# Altium footprint library WE-RJ45 LAN.PcbLib: 101 footprints (part 4 of 7)
Each footprint in its own frame and in the unit in brackets; x right, y up, seen from the top. Pads: shape width x height; smd on the part's side, far side on the other; paste and mask are expansions set on the pad; w line width, h text height; cw(c..) or ccw(c..) is an arc to the next point about the centre after c.
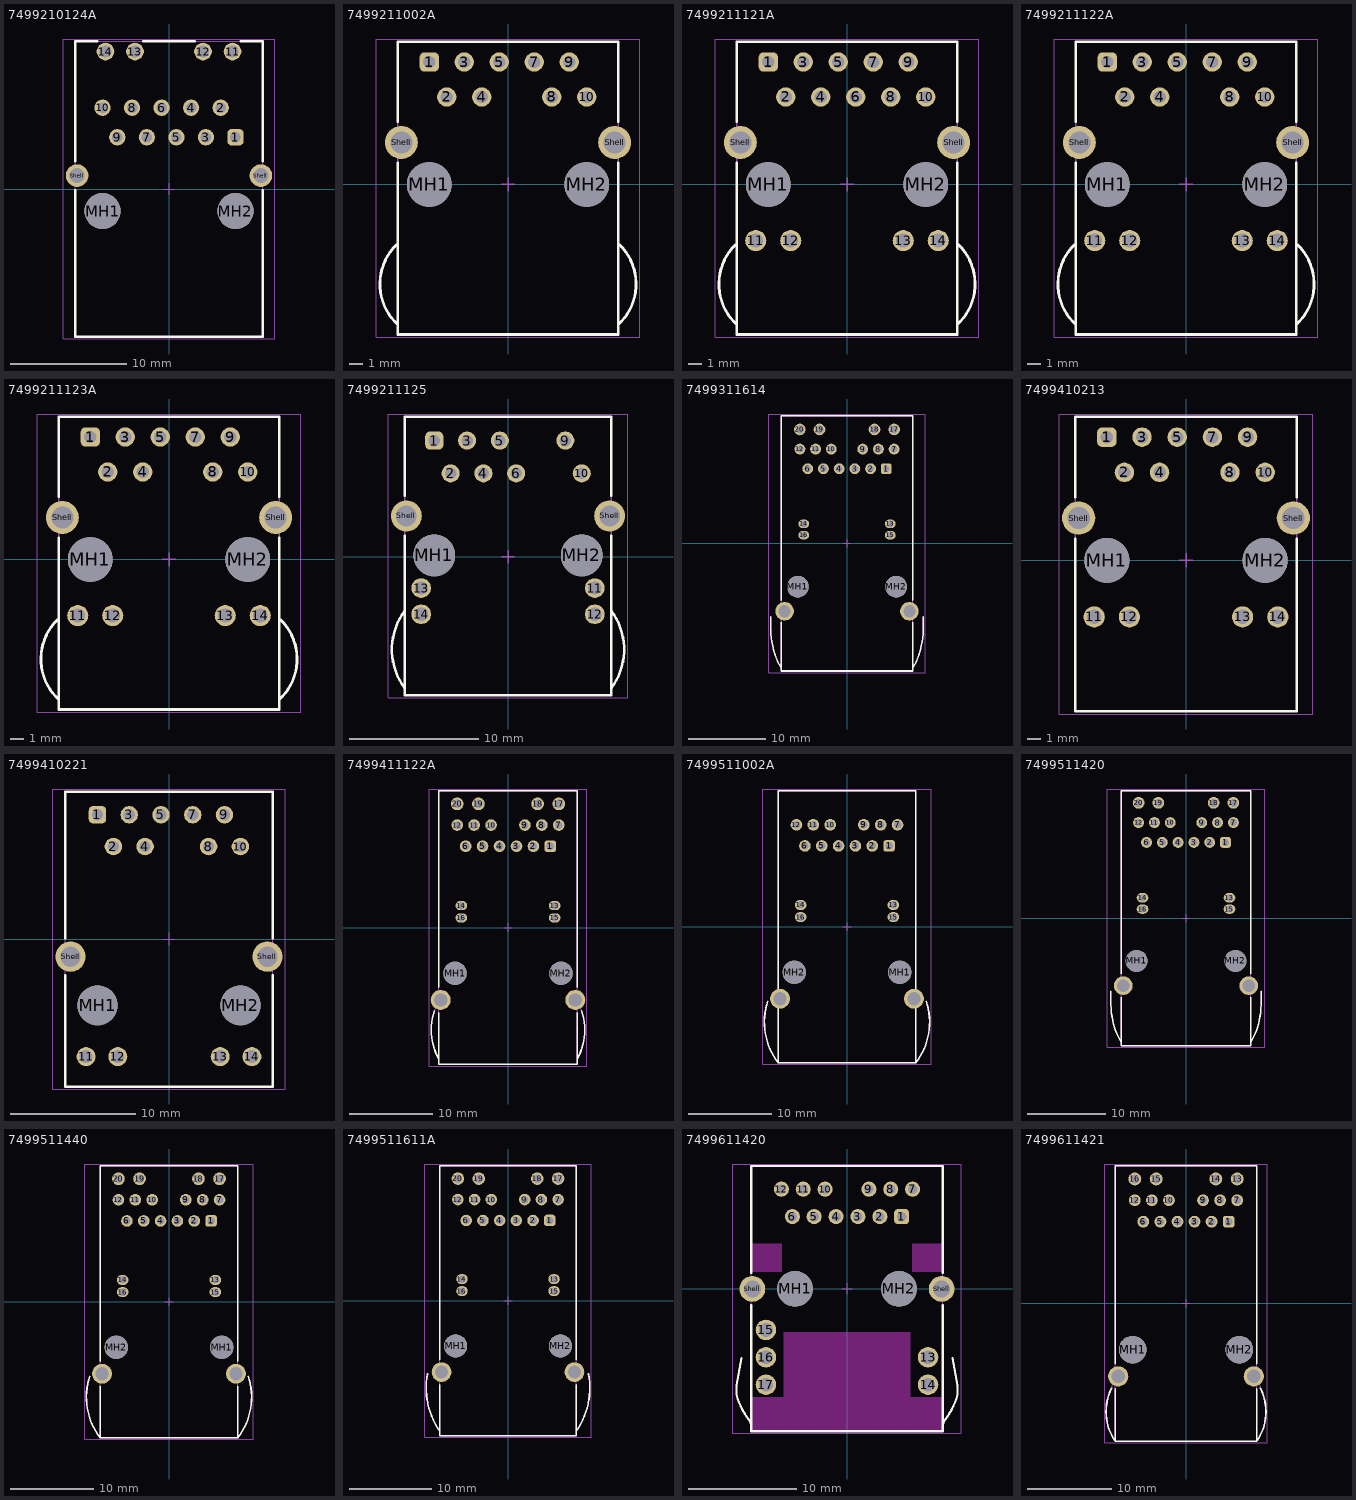
[diagram p3: the footprints below, top view; thin cyan lines are the x and y axes]

## 7499210124A [mm] "LAN Transformer, body 25.3x16.2mm"
height 13.5
pads (18):
  rrect50% 1.4x1.4 hole 0.9: 1(5.715,4.45)
  round 1.4 hole 0.9: 2(4.445,6.99) 3(3.175,4.45) 4(1.905,6.99) 5(0.635,4.45) 6(-0.635,6.99) 7(-1.905,4.45) 8(-3.175,6.99) 9(-4.445,4.45) 10(-5.715,6.99)
  round 1.52 hole 1.02: 11(5.465,11.82) 12(2.925,11.82) 13(-2.925,11.82) 14(-5.465,11.82)
  round 3.1 hole 3.1 unplated: MH1(-5.715,-1.9) MH2(5.715,-1.9)
  round 1.95 hole 1.3: Shell(-7.9,1.15) Shell(7.9,1.15)
Top Overlay:
  lines w0.2: -8.05,-0.1 -8.05,-12.7 8.05,-12.7 8.05,-0.1 ; -8.05,2.4 -8.05,12.7 -6.15,12.7 ; -2.24,12.7 2.24,12.7 ; 6.15,12.7 8.05,12.7 8.05,2.4
Top Assembly:
  lines w0.1: -8.05,-12.7 8.05,-12.7 8.05,12.7 -8.05,12.7 -8.05,-12.7
Top Designator:
  text ".Designator" at -3.647,-0.357 h1
Top 3D Body:
  lines w0.1: -8.05,-12.7 8.05,-12.7 8.05,12.7 -8.05,12.7 -8.05,-12.7
Top Courtyard:
  lines w0.05: -9.075,-12.9 -9.075,12.9 9.075,12.9 9.075,-12.9 -9.075,-12.9
Top Component Center:
  lines w0.1: -0.5,0 0.5,0 ; 0,-0.5 0,0.5
3D body "7499210124A.stp": height 13.55, standoff -3.25, extent -8.2,-12.7 8.2,12.7

## 7499211002A [mm] "Integrated RJ45 Transformer, THT, body 16.00 x 21.25 mm"
height 13.5
pads (13):
  rrect50% 1.4x1.4 hole 0.9: 1(-5.715,8.89)
  round 1.4 hole 0.9: 2(-4.445,6.35) 3(-3.175,8.89) 4(-1.905,6.35) 5(-0.635,8.89) 7(1.905,8.89) 8(3.175,6.35) 9(4.445,8.89) 10(5.715,6.35)
  round 3.25 hole 3.25 unplated: MH1(-5.715,0) MH2(5.715,0)
  round 2.4 hole 1.6: Shell(-7.745,3.05) Shell(7.745,3.05)
Top Overlay:
  lines w0.2: -8.099,-4.377 ccw(c-5.31,-7.23) -8.001,-10.176 ; -8,1.55 -8,-10.89 8,-10.89 8,1.55 ; -8,4.55 -8,10.36 8,10.36 8,4.55 ; 8.001,-10.176 ccw(c5.31,-7.23) 8.099,-4.377
Top Assembly:
  lines w0.1: -8.099,-4.377 ccw(c-5.31,-7.23) -8.001,-10.176 ; 8.001,-10.176 ccw(c5.31,-7.23) 8.099,-4.377 ; -8,-10.89 8,-10.89 8,10.36 -8,10.36 -8,-10.89
Top Designator:
  text ".Designator" at -3.647,-0.357 h1
Top 3D Body:
  lines w0.1: -8.099,-4.377 ccw(c-5.31,-7.23) -8.001,-10.176 ; 8.001,-10.176 ccw(c5.31,-7.23) 8.099,-4.377 ; -8,-10.89 8,-10.89 8,10.36 -8,10.36 -8,-10.89
Top Courtyard:
  lines w0.05: -9.548,-11.09 9.548,-11.09 9.548,10.56 -9.548,10.56 -9.548,-11.09
Top Component Center:
  lines w0.1: -0.5,0 0.5,0 ; 0,-0.5 0,0.5
3D body "7499211002A.stp": height 14.85, standoff -3.6, extent -9.348,-10.89 9.348,10.36

## 7499211121A [mm] "LAN Transformer, body 21.84x15.88mm"
height 13.95
pads (18):
  rrect50% 1.4x1.4 hole 0.9: 1(-5.715,8.89)
  round 1.4 hole 0.9: 2(-4.445,6.35) 3(-3.175,8.89) 4(-1.905,6.35) 5(-0.635,8.89) 6(0.635,6.35) 7(1.905,8.89) 8(3.175,6.35) 9(4.445,8.89) 10(5.715,6.35)
  round 1.53 hole 1.03: 11(-6.625,-4.08) 12(-4.085,-4.08) 13(4.085,-4.08) 14(6.625,-4.08)
  round 3.25 hole 3.25 unplated: MH1(-5.715,0) MH2(5.715,0)
  round 2.4 hole 1.6: Shell(-7.745,3.05) Shell(7.745,3.05)
Top Overlay:
  lines w0.2: -8.099,-4.377 ccw(c-5.31,-7.23) -8.001,-10.176 ; -8,1.55 -8,-10.89 8,-10.89 8,1.55 ; -8,4.55 -8,10.36 8,10.36 8,4.55 ; 8.001,-10.176 ccw(c5.31,-7.23) 8.099,-4.377
Top Assembly:
  lines w0.1: -8.099,-4.377 ccw(c-5.31,-7.23) -8.001,-10.176 ; 8.001,-10.176 ccw(c5.31,-7.23) 8.099,-4.377 ; -8,-10.89 8,-10.89 8,10.36 -8,10.36 -8,-10.89
Top Designator:
  text ".Designator" at -3.647,-0.357 h1
Top 3D Body:
  lines w0.1: -8.099,-4.377 ccw(c-5.31,-7.23) -8.001,-10.176 ; 8.001,-10.176 ccw(c5.31,-7.23) 8.099,-4.377 ; -8,-10.89 8,-10.89 8,10.36 -8,10.36 -8,-10.89
Top Courtyard:
  lines w0.05: -9.548,-11.09 9.548,-11.09 9.548,10.56 -9.548,10.56 -9.548,-11.09
Top Component Center:
  lines w0.1: -0.5,0 0.5,0 ; 0,-0.5 0,0.5
3D body "7499211121A.stp": height 14.9, standoff -3.55, extent -9.348,-10.89 9.348,10.36

## 7499211122A [mm] "RJ45 LAN Transformer, body 16.00 x 21.25 mm"
height 13.5
pads (17):
  rrect50% 1.4x1.4 hole 0.9: 1(-5.715,8.89)
  round 1.4 hole 0.9: 2(-4.445,6.35) 3(-3.175,8.89) 4(-1.905,6.35) 5(-0.635,8.89) 7(1.905,8.89) 8(3.175,6.35) 9(4.445,8.89) 10(5.715,6.35)
  round 1.53 hole 1.03: 11(-6.625,-4.08) 12(-4.085,-4.08) 13(4.085,-4.08) 14(6.625,-4.08)
  round 3.25 hole 3.25 unplated: MH1(-5.715,0) MH2(5.715,0)
  round 2.4 hole 1.6: Shell(-7.745,3.05) Shell(7.745,3.05)
Top Overlay:
  lines w0.2: -8.099,-4.377 ccw(c-5.31,-7.23) -8.001,-10.176 ; -8,1.55 -8,-10.89 8,-10.89 8,1.55 ; -8,4.55 -8,10.36 8,10.36 8,4.55 ; 8.001,-10.176 ccw(c5.31,-7.23) 8.099,-4.377
Top Assembly:
  lines w0.1: -8.099,-4.377 ccw(c-5.31,-7.23) -8.001,-10.176 ; 8.001,-10.176 ccw(c5.31,-7.23) 8.099,-4.377 ; -8,-10.89 -8,10.36 8,10.36 8,-10.89 -8,-10.89
Top Designator:
  text ".Designator" at -3.647,-0.357 h1
Top 3D Body:
  lines w0.1: -8.099,-4.377 ccw(c-5.31,-7.23) -8.001,-10.176 ; 8.001,-10.176 ccw(c5.31,-7.23) 8.099,-4.377 ; -8,-10.89 -8,10.36 8,10.36 8,-10.89 -8,-10.89
Top Courtyard:
  lines w0.05: -9.548,-11.09 -9.548,10.56 9.548,10.56 9.548,-11.09 -9.548,-11.09
Top Component Center:
  lines w0.1: -0.5,0 0.5,0 ; 0,-0.5 0,0.5
3D body "7499211122A.stp": height 14.9, standoff -3.55, extent -9.348,-10.89 9.348,10.36

## 7499211123A [mm] "Integrated RJ45 Transformer, THT, body 16.00 x 21.25 mm"
height 13.5
pads (17):
  rrect50% 1.4x1.4 hole 0.9: 1(-5.715,8.89)
  round 1.4 hole 0.9: 2(-4.445,6.35) 3(-3.175,8.89) 4(-1.905,6.35) 5(-0.635,8.89) 7(1.905,8.89) 8(3.175,6.35) 9(4.445,8.89) 10(5.715,6.35)
  round 1.53 hole 1.03: 11(-6.625,-4.08) 12(-4.085,-4.08) 13(4.085,-4.08) 14(6.625,-4.08)
  round 3.25 hole 3.25 unplated: MH1(-5.715,0) MH2(5.715,0)
  round 2.4 hole 1.6: Shell(-7.745,3.05) Shell(7.745,3.05)
Top Overlay:
  lines w0.2: -8.099,-4.377 ccw(c-5.31,-7.23) -8.001,-10.176 ; -8,1.55 -8,-10.89 8,-10.89 8,1.55 ; -8,4.55 -8,10.36 8,10.36 8,4.55 ; 8.001,-10.176 ccw(c5.31,-7.23) 8.099,-4.377
Top Assembly:
  lines w0.1: -8.099,-4.377 ccw(c-5.31,-7.23) -8.001,-10.176 ; 8.001,-10.176 ccw(c5.31,-7.23) 8.099,-4.377 ; -8,-10.89 -8,10.36 8,10.36 8,-10.89 -8,-10.89
Top Designator:
  text ".Designator" at -3.647,-0.357 h1
Top 3D Body:
  lines w0.1: -8.099,-4.377 ccw(c-5.31,-7.23) -8.001,-10.176 ; 8.001,-10.176 ccw(c5.31,-7.23) 8.099,-4.377 ; -8,-10.89 -8,10.36 8,10.36 8,-10.89 -8,-10.89
Top Courtyard:
  lines w0.05: -9.548,-11.09 -9.548,10.56 9.548,10.56 9.548,-11.09 -9.548,-11.09
Top Component Center:
  lines w0.1: -0.5,0 0.5,0 ; 0,-0.5 0,0.5
3D body "7499211123A.stp": height 14.85, standoff -3.6, extent -9.348,-10.89 9.348,10.36

## 7499211125 [mm] "LAN Transformer, body 21.3x16mm"
height 13.55
pads (16):
  rrect50% 1.4x1.4 hole 0.89: 1(-5.715,8.99)
  round 1.4 hole 0.89: 2(-4.445,6.45) 3(-3.175,8.99) 4(-1.905,6.45) 5(-0.635,8.99) 6(0.635,6.45) 9(4.445,8.99) 10(5.715,6.45)
  round 1.52 hole 1.02: 11(6.725,-2.44) 12(6.725,-4.47) 13(-6.725,-2.44) 14(-6.725,-4.47)
  round 3.25 hole 3.25 unplated: MH1(-5.715,0.1) MH2(5.715,0.1)
  round 2.4 hole 1.6: Shell(-7.875,3.15) Shell(7.875,3.15)
Top Overlay:
  lines w0.2: -8,-10.2 cw(c-4,-7.2) -8,-4.2 ; -8,1.6 -8,-10.75 8,-10.75 8,1.6 ; -8,4.7 -8,10.85 8,10.85 8,4.7 ; 8,-10.2 ccw(c4,-7.2) 8,-4.2
Top Assembly:
  lines w0.1: -8,-10.2 cw(c-4,-7.2) -8,-4.2 ; 8,-10.2 ccw(c4,-7.2) 8,-4.2 ; -8,-10.75 -8,10.85 8,10.85 8,-10.75 ; -8,-10.75 8,-10.75 ; -8,-10.75 8,-10.75
Top Designator:
  text ".Designator" at -3.647,-0.357 h1
Top 3D Body:
  lines w0.1: -8,-10.2 cw(c-4,-7.2) -8,-4.2 ; 8,-10.2 ccw(c4,-7.2) 8,-4.2 ; -8,-10.75 -8,10.85 8,10.85 8,-10.75 ; -8,-10.75 8,-10.75 ; -8,-10.75 8,-10.75
Top Courtyard:
  lines w0.05: -9.275,-10.95 9.275,-10.95 9.275,11.05 -9.275,11.05 -9.275,-10.95
Top Component Center:
  lines w0.1: -0.5,0 0.5,0 ; 0,-0.5 0,0.5
3D body "7499211125.stp": height 14.65, standoff -2.98, extent -8.956,-10.75 8.956,10.85

## 7499311614 [mm] "10/100/1000 Base-T, PoE, THT, 1x1, Tab up, with shield tabs, with LED L-R green/orange-yellow, ETR"
height 13.87
pads (24):
  rrect50% 1.4x1.4 hole 0.89: 1(5.075,9.63)
  round 1.4 hole 0.89: 2(3.045,9.63) 3(1.015,9.63) 4(-1.015,9.63) 5(-3.045,9.63) 6(-5.075,9.63) 7(6.09,12.17) 8(4.06,12.17) 9(2.03,12.17) 10(-2.03,12.17) 11(-4.06,12.17) 12(-6.09,12.17)
  oval 1.4x1.1 hole 0.89: 13(5.59,2.51) 14(-5.59,2.51) 15(5.59,1.05) 16(-5.59,1.05)
  round 1.5 hole 1.02: 17(6.095,14.71) 18(3.555,14.71) 19(-3.555,14.71) 20(-6.095,14.71)
  round 2.8 hole 2.8 unplated: MH1(-6.35,-5.61) MH2(6.35,-5.61)
  round 2.4 hole 1.57: Shell(-8.065,-8.79) Shell(8.065,-8.79)
Top Overlay:
  lines w0.2: -9.857,-9.51 -9.857,-11.238 ccw(c1.3,-10.91) -9.621,-13.217 ccw(c-1.503,-11.736) -8.5,-16.11 ; -8.5,-10.21 -8.5,-16.51 8.5,-16.51 8.5,-10.21 ; -8.5,-7.37 -8.5,16.51 8.5,16.51 8.5,-7.37 ; 8.5,-16.11 ccw(c1.503,-11.736) 9.621,-13.217 ccw(c-1.3,-10.91) 9.857,-11.238 9.857,-9.51
Top Assembly:
  lines w0.1: -9.857,-9.51 -9.857,-11.238 ccw(c1.3,-10.91) -9.621,-13.217 ccw(c-1.503,-11.736) -8.5,-16.11 ; 8.5,-16.11 ccw(c1.503,-11.736) 9.621,-13.217 ccw(c-1.3,-10.91) 9.857,-11.238 9.857,-9.51 ; -8.5,-16.51 -8.5,16.51 8.5,16.51 8.5,-16.51 -8.5,-16.51
Top Designator:
  text ".Designator" at -3.647,-0.357 h1
Top 3D Body:
  lines w0.1: -9.857,-9.51 -9.857,-11.238 ccw(c1.3,-10.91) -9.621,-13.217 ccw(c-1.503,-11.736) -8.5,-16.11 ; 8.5,-16.11 ccw(c1.503,-11.736) 9.621,-13.217 ccw(c-1.3,-10.91) 9.857,-11.238 9.857,-9.51 ; -8.5,-16.51 -8.5,16.51 8.5,16.51 8.5,-16.51 -8.5,-16.51
Top Courtyard:
  lines w0.05: -10.09,-16.71 -10.09,16.71 10.09,16.71 10.09,-16.71 -10.09,-16.71
Top Component Center:
  lines w0.1: -0.5,0 0.5,0 ; 0,-0.5 0,0.5
3D body "7499311614.stp": height 15.53, standoff -3.32, extent -9.89,-16.51 9.89,16.51

## 7499410213 [mm] "Integrated RJ45 Transformer, THT, body 16.00 x 21.25 mm"
height 13.5
pads (17):
  rrect50% 1.4x1.4 hole 0.9: 1(-5.715,8.89)
  round 1.4 hole 0.9: 2(-4.445,6.35) 3(-3.175,8.89) 4(-1.905,6.35) 5(-0.635,8.89) 7(1.905,8.89) 8(3.175,6.35) 9(4.445,8.89) 10(5.715,6.35)
  round 1.53 hole 1.03: 11(-6.625,-4.08) 12(-4.085,-4.08) 13(4.085,-4.08) 14(6.625,-4.08)
  round 3.25 hole 3.25 unplated: MH1(-5.715,0) MH2(5.715,0)
  round 2.4 hole 1.6: Shell(-7.745,3.05) Shell(7.745,3.05)
Top Overlay:
  lines w0.2: -8,1.55 -8,-10.89 8,-10.89 8,1.55 ; -8,4.55 -8,10.36 8,10.36 8,4.55
Top Assembly:
  lines w0.1: -8,-10.89 8,-10.89 8,10.36 -8,10.36 -8,-10.89
Top Designator:
  text ".Designator" at -3.647,-0.357 h1
Top 3D Body:
  lines w0.1: -8,-10.89 8,-10.89 8,10.36 -8,10.36 -8,-10.89
Top Courtyard:
  lines w0.05: -9.145,-11.09 9.145,-11.09 9.145,10.56 -9.145,10.56 -9.145,-11.09
Top Component Center:
  lines w0.1: -0.5,0 0.5,0 ; 0,-0.5 0,0.5
3D body "7499410213.stp": height 13.5, standoff -3.6, extent -8.15,-10.89 8.15,10.36

## 7499410221 [mm] "LAN Transformer, body 23.6x16.6mm"
height 17.1
pads (17):
  rrect50% 1.4x1.4 hole 0.89: 1(-5.72,9.94)
  round 1.4 hole 0.89: 2(-4.45,7.4) 3(-3.18,9.94) 4(-1.91,7.4) 5(-0.64,9.94) 7(1.9,9.94) 8(3.17,7.4) 9(4.44,9.94) 10(5.71,7.4)
  round 1.52 hole 1.02: 11(-6.635,-9.41) 12(-4.095,-9.41) 13(4.095,-9.41) 14(6.635,-9.41)
  round 3.2 hole 3.2 unplated: MH1(-5.715,-5.3) MH2(5.715,-5.3)
  round 2.43 hole 1.63: Shell(-7.875,-1.41) Shell(7.875,-1.41)
Top Overlay:
  lines w0.2: -8.3,-2.9 -8.3,-11.8 8.3,-11.8 8.3,-2.9 ; -8.3,0.05 -8.3,11.8 8.3,11.8 8.3,0.05
Top Assembly:
  lines w0.1: -8.3,-11.8 8.3,-11.8 8.3,11.8 -8.3,11.8 -8.3,-11.8
Top Designator:
  text ".Designator" at -3.647,-0.357 h1
Top 3D Body:
  lines w0.1: -8.3,-11.8 8.3,-11.8 8.3,11.8 -8.3,11.8 -8.3,-11.8
Top Courtyard:
  lines w0.05: -9.29,-12 -9.29,12 9.29,12 9.29,-12 -9.29,-12
Top Component Center:
  lines w0.1: -0.5,0 0.5,0 ; 0,-0.5 0,0.5
3D body "7499410221.stp": height 17.55, standoff -2.9, extent -8.3,-11.8 8.3,11.8

## 7499411122A [mm] "LAN Transformer, body 33.02x17mm"
height 13.87
pads (24):
  rrect50% 1.4x1.4 hole 0.9: 1(5.075,9.74)
  round 1.4 hole 0.9: 2(3.045,9.74) 3(1.015,9.74) 4(-1.015,9.74) 5(-3.045,9.74) 6(-5.075,9.74) 7(6.09,12.28) 8(4.06,12.28) 9(2.03,12.28) 10(-2.03,12.28) 11(-4.06,12.28) 12(-6.09,12.28)
  oval 1.4x1.1 hole 0.9: 13(5.59,2.62) 14(-5.59,2.62) 15(5.59,1.16) 16(-5.59,1.16)
  round 1.53 hole 1.03: 17(6.09,14.82) 18(3.55,14.82) 19(-3.55,14.82) 20(-6.09,14.82)
  round 2.8 hole 2.8 unplated: MH1(-6.35,-5.5) MH2(6.35,-5.5)
  round 2.4 hole 1.6: Shell(-8.065,-8.68) Shell(8.065,-8.68)
Top Overlay:
  lines w0.2: -8.82,-10.01 ccw(c-2.15,-12.3) -8.3,-15.75 ; -8.3,-10.2 -8.3,-16.4 8.3,-16.4 8.3,-10.2 ; -8.3,-7.16 -8.3,16.4 8.3,16.4 8.3,-7.16 ; 8.3,-15.75 ccw(c2.15,-12.3) 8.82,-10.01
Top Assembly:
  lines w0.1: -8.3,-15.75 cw(c-2.15,-12.3) -8.3,-8.85 ; 8.3,-15.75 ccw(c2.15,-12.3) 8.3,-8.85 ; -8.3,-16.4 -8.3,16.4 8.3,16.4 8.3,-16.4 -8.3,-16.4
Top Designator:
  text ".Designator" at -3.647,-0.357 h1
Top 3D Body:
  lines w0.1: -8.3,-15.75 cw(c-2.15,-12.3) -8.3,-8.85 ; 8.3,-15.75 ccw(c2.15,-12.3) 8.3,-8.85 ; -8.3,-16.4 -8.3,16.4 8.3,16.4 8.3,-16.4 -8.3,-16.4
Top Courtyard:
  lines w0.05: -9.465,-16.6 -9.465,16.6 9.465,16.6 9.465,-16.6 -9.465,-16.6
Top Component Center:
  lines w0.1: -0.5,0 0.5,0 ; 0,-0.5 0,0.5
3D body "7499411122A.stp": height 14.67, standoff -3, extent -9.193,-16.4 9.193,16.4

## 7499511002A [mm] "LAN Transformer, body 33.02x17.02mm"
height 13.87
pads (20):
  rrect50% 1.4x1.4 hole 0.9: 1(5.075,9.74)
  round 1.4 hole 0.9: 2(3.045,9.74) 3(1.015,9.74) 4(-1.015,9.74) 5(-3.045,9.74) 6(-5.075,9.74) 7(6.09,12.28) 8(4.06,12.28) 9(2.03,12.28) 10(-2.03,12.28) 11(-4.06,12.28) 12(-6.09,12.28)
  oval 1.4x1.2 hole 0.9: 13(5.59,2.62) 14(-5.59,2.62) 15(5.59,1.16) 16(-5.59,1.16)
  round 2.8 hole 2.8 unplated: MH1(6.35,-5.5) MH2(-6.35,-5.5)
  round 2.4 hole 1.6: Shell(-8.065,-8.68) Shell(8.065,-8.68)
Top Overlay:
  lines w0.2: -9.557,-8.983 ccw(c-1.9,-11.5) -8.3,-16.4 ; 9.557,-8.983 cw(c1.9,-11.5) 8.3,-16.4 ; -8.3,-16.4 -8.3,16.4 8.3,16.4 8.3,-16.4 ; -8.3,-16.4 8.3,-16.4
Top Assembly:
  lines w0.1: -9.557,-8.983 ccw(c-1.9,-11.5) -8.3,-16.4 ; 9.557,-8.983 cw(c1.9,-11.5) 8.3,-16.4 ; -8.3,-16.4 -8.3,16.4 8.3,16.4 8.3,-16.4 ; -8.3,-16.4 8.3,-16.4
Top Designator:
  text ".Designator" at -3.647,-0.357 h1
Top 3D Body:
  lines w0.1: -9.557,-8.983 ccw(c-1.9,-11.5) -8.3,-16.4 ; 9.557,-8.983 cw(c1.9,-11.5) 8.3,-16.4 ; -8.3,-16.4 -8.3,16.4 8.3,16.4 8.3,-16.4 ; -8.3,-16.4 8.3,-16.4
Top Courtyard:
  lines w0.05: -10.149,-16.6 10.149,-16.6 10.149,16.6 -10.149,16.6 -10.149,-16.6
Top Component Center:
  lines w0.1: -0.5,0 0.5,0 ; 0,-0.5 0,0.5
3D body "7499511002A.stp": height 15.43, standoff -3.58, extent -9.949,-16.4 9.949,16.4

## 7499511420 [mm] "10/100/1000 Base-T, PoE+, THT, 1x1, Tab up, with shield tabs, with LED L-R green/yellow-green/yellow"
height 13.87
pads (24):
  rrect50% 1.4x1.4 hole 0.9: 1(5.075,9.74)
  round 1.4 hole 0.9: 2(3.045,9.74) 3(1.015,9.74) 4(-1.015,9.74) 5(-3.045,9.74) 6(-5.075,9.74) 7(6.09,12.28) 8(4.06,12.28) 9(2.03,12.28) 10(-2.03,12.28) 11(-4.06,12.28) 12(-6.09,12.28)
  oval 1.5x1.2 hole 0.9: 13(5.59,2.62) 14(-5.59,2.62) 15(5.59,1.16) 16(-5.59,1.16)
  round 1.5 hole 1.02: 17(6.09,14.82) 18(3.55,14.82) 19(-3.55,14.82) 20(-6.09,14.82)
  round 2.8 hole 2.8 unplated: MH1(-6.35,-5.5) MH2(6.35,-5.5)
  round 2.4 hole 1.6: Shell(-8.065,-8.68) Shell(8.065,-8.68)
Top Overlay:
  lines w0.2: -9.657,-9.4 -9.657,-11.128 ccw(c1.5,-10.8) -9.421,-13.107 ccw(c-1.303,-11.626) -8.3,-16 ; -8.3,-10.2 -8.3,-16.4 8.3,-16.4 8.3,-10.2 ; -8.3,-7.16 -8.3,16.4 8.3,16.4 8.3,-7.16 ; 8.3,-16 ccw(c1.303,-11.626) 9.421,-13.107 ccw(c-1.5,-10.8) 9.657,-11.128 9.657,-9.4
Top Assembly:
  lines w0.1: -9.657,-9.4 -9.657,-11.128 ccw(c1.5,-10.8) -9.421,-13.107 ccw(c-1.303,-11.626) -8.3,-16 ; 8.3,-16 ccw(c1.303,-11.626) 9.421,-13.107 ccw(c-1.5,-10.8) 9.657,-11.128 9.657,-9.4 ; -8.3,-16.4 8.3,-16.4 8.3,16.4 -8.3,16.4 -8.3,-16.4
Top Designator:
  text ".Designator" at -3.647,-0.357 h1
Top 3D Body:
  lines w0.1: -9.657,-9.4 -9.657,-11.128 ccw(c1.5,-10.8) -9.421,-13.107 ccw(c-1.303,-11.626) -8.3,-16 ; 8.3,-16 ccw(c1.303,-11.626) 9.421,-13.107 ccw(c-1.5,-10.8) 9.657,-11.128 9.657,-9.4 ; -8.3,-16.4 8.3,-16.4 8.3,16.4 -8.3,16.4 -8.3,-16.4
Top Courtyard:
  lines w0.05: -10.115,-16.6 -10.115,16.6 10.115,16.6 10.115,-16.6 -10.115,-16.6
Top Component Center:
  lines w0.1: -0.5,0 0.5,0 ; 0,-0.5 0,0.5
3D body "7499511420.stp": height 15.23, standoff -3.66, extent -9.915,-16.4 9.915,16.4

## 7499511440 [mm] "LAN Transformer, body 33.02x17mm"
height 13.87
pads (24):
  rrect50% 1.4x1.4 hole 0.9: 1(5.075,9.74)
  round 1.4 hole 0.9: 2(3.045,9.74) 3(1.015,9.74) 4(-1.015,9.74) 5(-3.045,9.74) 6(-5.075,9.74) 7(6.09,12.28) 8(4.06,12.28) 9(2.03,12.28) 10(-2.03,12.28) 11(-4.06,12.28) 12(-6.09,12.28)
  oval 1.4x1.2 hole 0.9: 13(5.59,2.62) 14(-5.59,2.62) 15(5.59,1.16) 16(-5.59,1.16)
  round 1.52 hole 1.03: 17(6.09,14.82) 18(3.55,14.82) 19(-3.55,14.82) 20(-6.09,14.82)
  round 2.8 hole 2.8 unplated: MH1(6.35,-5.5) MH2(-6.35,-5.5)
  round 2.4 hole 1.6: Shell(-8.065,-8.68) Shell(8.065,-8.68)
Top Overlay:
  lines w0.2: -9.557,-8.983 ccw(c-1.9,-11.5) -8.3,-16.4 ; -8.3,-10.2 -8.3,-16.4 ; -8.3,-7.16 -8.3,16.4 8.3,16.4 8.3,-7.16 ; 8.3,-10.2 8.3,-16.4 ; 9.557,-8.983 cw(c1.9,-11.5) 8.3,-16.4 ; -8.3,-16.4 8.3,-16.4
Top Assembly:
  lines w0.1: -9.557,-8.983 ccw(c-1.9,-11.5) -8.3,-16.4 ; 9.557,-8.983 cw(c1.9,-11.5) 8.3,-16.4 ; -8.3,-16.4 -8.3,16.4 8.3,16.4 8.3,-16.4 ; -8.3,-16.4 8.3,-16.4
Top Designator:
  text ".Designator" at -3.647,-0.357 h1
Top 3D Body:
  lines w0.1: -9.557,-8.983 ccw(c-1.9,-11.5) -8.3,-16.4 ; 9.557,-8.983 cw(c1.9,-11.5) 8.3,-16.4 ; -8.3,-16.4 -8.3,16.4 8.3,16.4 8.3,-16.4 ; -8.3,-16.4 8.3,-16.4
Top Courtyard:
  lines w0.05: -10.15,-16.6 10.15,-16.6 10.15,16.6 -10.15,16.6 -10.15,-16.6
Top Component Center:
  lines w0.1: -0.5,0 0.5,0 ; 0,-0.5 0,0.5
3D body "7499511440.stp": height 15.3, standoff -3.64, extent -9.95,-16.4 9.95,16.4

## 7499511611A [mm] "LAN Transformer, body 33.02x17mm"
height 13.87
pads (24):
  rrect50% 1.4x1.4 hole 0.9: 1(5.075,9.74)
  round 1.4 hole 0.9: 2(3.045,9.74) 3(1.015,9.74) 4(-1.015,9.74) 5(-3.045,9.74) 6(-5.075,9.74) 7(6.09,12.28) 8(4.06,12.28) 9(2.03,12.28) 10(-2.03,12.28) 11(-4.06,12.28) 12(-6.09,12.28)
  oval 1.4x1.2 hole 0.9: 13(5.59,2.62) 14(-5.59,2.62) 15(5.59,1.16) 16(-5.59,1.16)
  round 1.52 hole 1.03: 17(6.09,14.82) 18(3.55,14.82) 19(-3.55,14.82) 20(-6.09,14.82)
  round 2.8 hole 2.8 unplated: MH1(-6.35,-5.5) MH2(6.35,-5.5)
  round 2.4 hole 1.6: Shell(-8.065,-8.68) Shell(8.065,-8.68)
Top Overlay:
  lines w0.2: -9.777,-8.886 ccw(c-0.7,-10.6) -8.3,-15.85 ; -8.3,-10.2 -8.3,-16.4 8.3,-16.4 8.3,-10.2 ; -8.3,-7.16 -8.3,16.4 8.3,16.4 8.3,-7.16 ; 8.3,-15.85 ccw(c0.7,-10.6) 9.777,-8.886
Top Assembly:
  lines w0.1: -9.777,-8.886 ccw(c-0.7,-10.6) -8.3,-15.85 ; 8.3,-15.85 ccw(c0.7,-10.6) 9.777,-8.886 ; -8.3,-16.4 -8.3,16.4 8.3,16.4 8.3,-16.4 -8.3,-16.4
Top Designator:
  text ".Designator" at -3.647,-0.357 h1
Top 3D Body:
  lines w0.1: -9.777,-8.886 ccw(c-0.7,-10.6) -8.3,-15.85 ; 8.3,-15.85 ccw(c0.7,-10.6) 9.777,-8.886 ; -8.3,-16.4 -8.3,16.4 8.3,16.4 8.3,-16.4 -8.3,-16.4
Top Courtyard:
  lines w0.05: -10.115,-16.6 10.115,-16.6 10.115,16.6 -10.115,16.6 -10.115,-16.6
Top Component Center:
  lines w0.1: -0.5,0 0.5,0 ; 0,-0.5 0,0.5
3D body "7499511611A.stp": height 15.25, standoff -3.79, extent -9.915,-16.4 9.915,16.4

## 7499611420 [mm] "10/100/1000/10G Base-T, THT, 1x1, Tab up, with shield tabs, with LED L-R yellow/green-green"
height 11.3
pads (21):
  rrect50% 1.4x1.4 hole 0.89: 1(5.075,6.71)
  round 1.4 hole 0.89: 2(3.045,6.71) 3(1.015,6.71) 4(-1.015,6.71) 5(-3.045,6.71) 6(-5.075,6.71) 7(6.09,9.25) 8(4.06,9.25) 9(2.03,9.25) 10(-2.03,9.25) 11(-4.06,9.25) 12(-6.09,9.25)
  round 1.9 hole 1.27: 13(7.52,-6.35) 14(7.52,-8.89) 15(-7.52,-3.81) 16(-7.52,-6.35) 17(-7.52,-8.89)
  round 3.3 hole 3.3 unplated: MH1(-4.825,0) MH2(4.825,0)
  round 2.4 hole 1.57: Shell(-8.79,0) Shell(8.79,0)
Top Overlay:
  lines w0.2: -9.803,-6.408 -10.253,-8.957 ccw(c-3.459,-9.443) -10.261,-9.802 ccw(c-3.781,-8.079) -9.271,-11.929 cw(c-10.549,-13.09) -8.89,-12.61 ; -8.89,-1.51 -8.89,-13.21 8.89,-13.21 8.89,-1.51 ; -8.89,1.49 -8.89,11.39 8.89,11.39 8.89,1.49 ; 8.89,-12.61 cw(c10.549,-13.09) 9.271,-11.929 ccw(c3.781,-8.079) 10.261,-9.802 ccw(c3.459,-9.443) 10.253,-8.957 9.803,-6.408
Keep-Out Layer:
  region: -5.88,-4.01 5.88,-4.01 5.88,-10.04 8.89,-10.04 8.89,-13.21 -8.89,-13.21 -8.89,-10.04 -5.88,-10.04
  region: -8.89,4.2 -6.075,4.2 -6.075,1.59 -8.89,1.59
  region: 8.89,4.2 6.075,4.2 6.075,1.59 8.89,1.59
Top Assembly:
  lines w0.1: -9.803,-6.408 -10.253,-8.957 ccw(c-3.459,-9.443) -10.261,-9.802 ccw(c-3.781,-8.079) -9.271,-11.929 cw(c-10.549,-13.09) -8.89,-12.61 ; 8.89,-12.61 cw(c10.549,-13.09) 9.271,-11.929 ccw(c3.781,-8.079) 10.261,-9.802 ccw(c3.459,-9.443) 10.253,-8.957 9.803,-6.408 ; -8.89,-13.21 -8.89,11.39 8.89,11.39 8.89,-13.21 -8.89,-13.21
Top Designator:
  text ".Designator" at -3.647,-0.357 h1
Top 3D Body:
  lines w0.1: -9.803,-6.408 -10.253,-8.957 ccw(c-3.459,-9.443) -10.261,-9.802 ccw(c-3.781,-8.079) -9.271,-11.929 cw(c-10.549,-13.09) -8.89,-12.61 ; 8.89,-12.61 cw(c10.549,-13.09) 9.271,-11.929 ccw(c3.781,-8.079) 10.261,-9.802 ccw(c3.459,-9.443) 10.253,-8.957 9.803,-6.408 ; -8.89,-13.21 -8.89,11.39 8.89,11.39 8.89,-13.21 -8.89,-13.21
Top Courtyard:
  lines w0.05: -10.587,-13.41 -10.587,11.59 10.587,11.59 10.587,-13.41 -10.587,-13.41
Top Component Center:
  lines w0.1: -0.5,0 0.5,0 ; 0,-0.5 0,0.5
3D body "7499611420.stp": height 12.85, standoff -3.25, extent -10.387,-13.21 10.387,11.39

## 7499611421 [mm] "10/100/1000/10G Base-T, THT, 1x1, Tab up, with shield tabs, with LED L-R yellow/green-green"
height 13.87
pads (20):
  rrect50% 1.4x1.4 hole 0.9: 1(5.075,9.73)
  round 1.4 hole 0.9: 2(3.045,9.73) 3(1.015,9.73) 4(-1.015,9.73) 5(-3.045,9.73) 6(-5.075,9.73) 7(6.09,12.27) 8(4.06,12.27) 9(2.03,12.27) 10(-2.03,12.27) 11(-4.06,12.27) 12(-6.09,12.27)
  round 1.53 hole 1.03: 13(6.09,14.81) 14(3.55,14.81) 15(-3.55,14.81) 16(-6.09,14.81)
  round 3.3 hole 3.3 unplated: MH1(-6.35,-5.51) MH2(6.35,-5.51)
  round 2.4 hole 1.6: Shell(-8.065,-8.69) Shell(8.065,-8.69)
Top Overlay:
  lines w0.2: -8.878,-10.135 ccw(c-3.287,-12.887) -8.435,-16.4 ; -8.435,-10.2 -8.435,-16.4 ; -8.435,-7.18 -8.435,16.4 8.435,16.4 8.435,-7.18 ; 8.435,-10.2 8.435,-16.4 ; 8.878,-10.135 cw(c3.287,-12.887) 8.435,-16.4 ; -8.435,-16.4 8.435,-16.4
Top Assembly:
  lines w0.1: -8.792,-9.075 cw(c-10.078,-9.504) -8.878,-10.135 ccw(c-3.287,-12.887) -8.435,-16.4 ; 8.792,-9.075 ccw(c10.078,-9.504) 8.878,-10.135 cw(c3.287,-12.887) 8.435,-16.4 ; -8.435,-16.4 8.435,-16.4 ; -8.435,-16.4 -8.435,16.4 8.435,16.4 8.435,-16.4
Top Designator:
  text ".Designator" at -3.647,-0.357 h1
Top 3D Body:
  lines w0.1: -8.792,-9.075 cw(c-10.078,-9.504) -8.878,-10.135 ccw(c-3.287,-12.887) -8.435,-16.4 ; 8.792,-9.075 ccw(c10.078,-9.504) 8.878,-10.135 cw(c3.287,-12.887) 8.435,-16.4 ; -8.435,-16.4 8.435,-16.4 ; -8.435,-16.4 -8.435,16.4 8.435,16.4 8.435,-16.4
Top Courtyard:
  lines w0.05: -9.7,-16.6 9.7,-16.6 9.7,16.59 -9.7,16.59 -9.7,-16.6
Top Component Center:
  lines w0.1: -0.5,0 0.5,0 ; 0,-0.5 0,0.5
3D body "7499611421.stp": height 15, standoff -3.3, extent -9.5,-16.4 9.5,16.4